# Altium footprint library FootPrintLib_8.PcbLib: 590 footprints (part 3 of 37)
Each footprint in its own frame and in the unit in brackets; x right, y up, seen from the top. Pads: shape width x height; smd on the part's side, far side on the other; paste and mask are expansions set on the pad; w line width, h text height; cw(c..) or ccw(c..) is an arc to the next point about the centre after c.
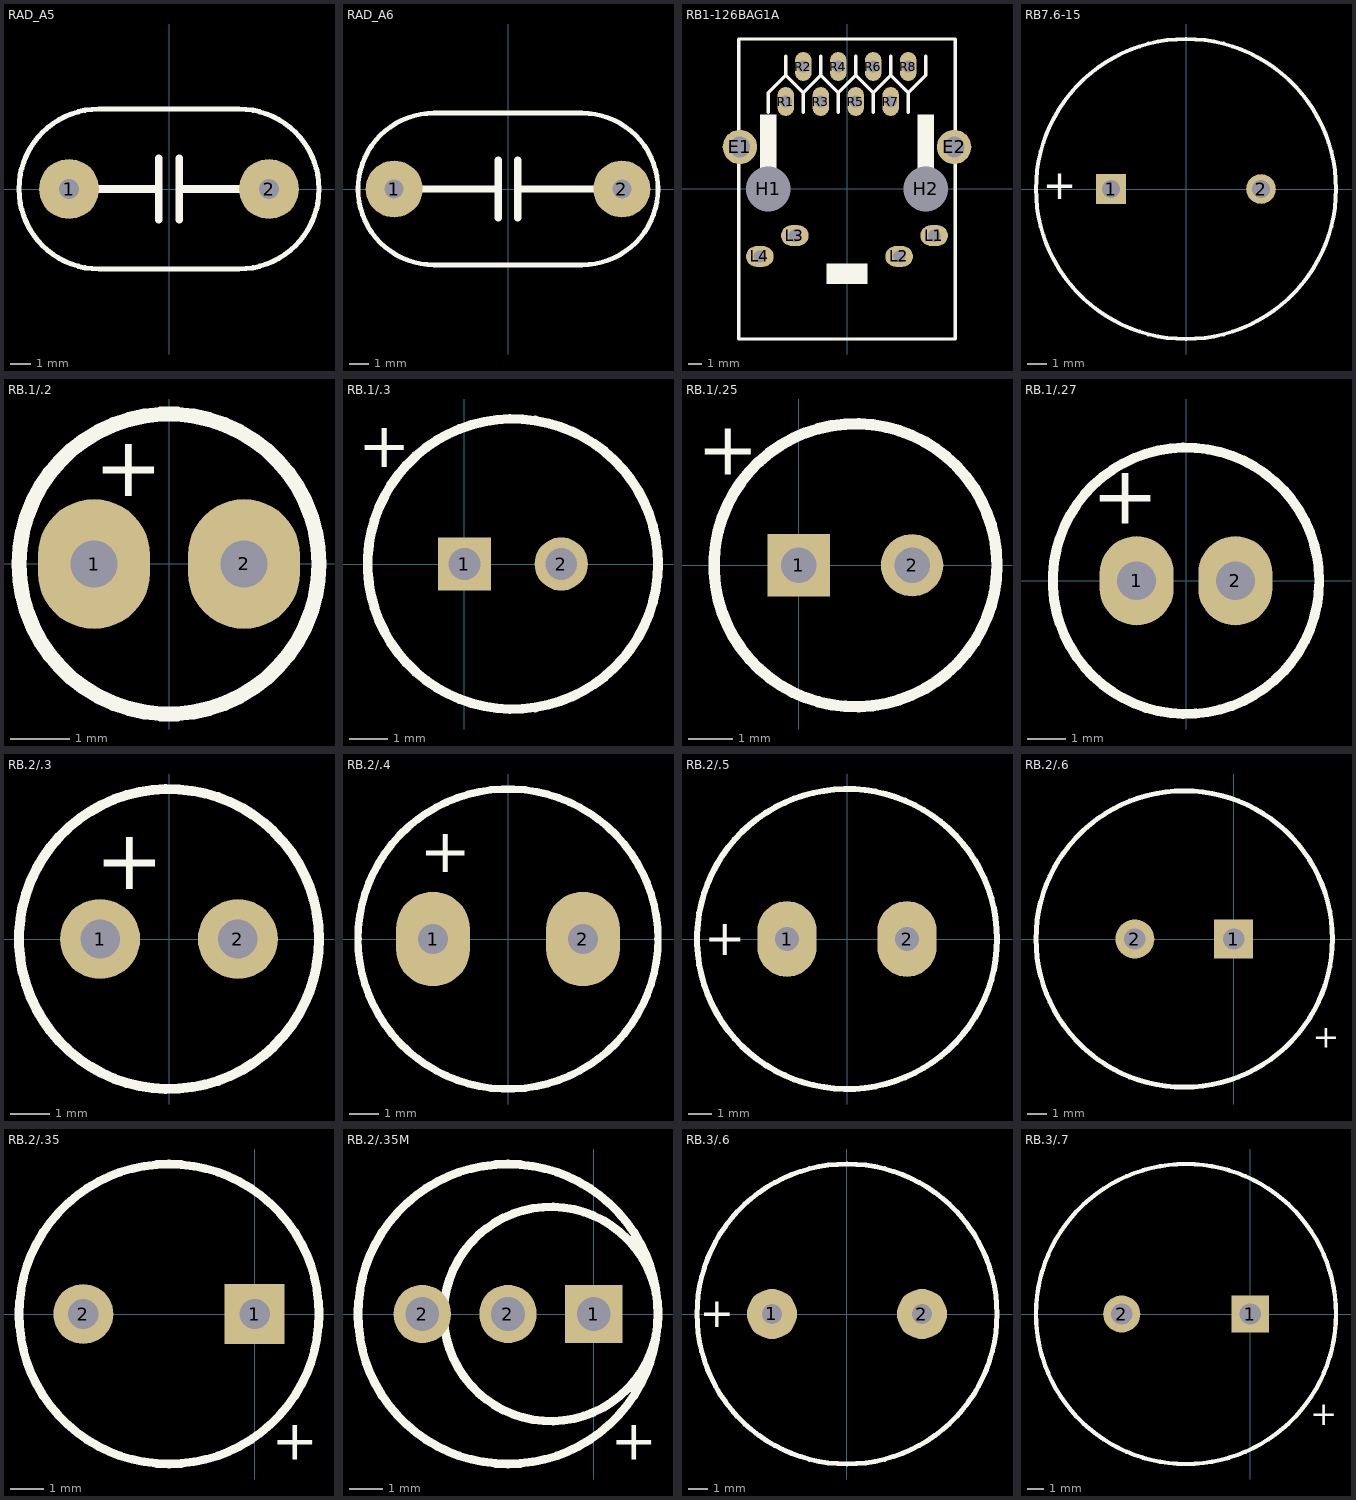
[diagram p2: the footprints below, top view; thin cyan lines are the x and y axes]

## RAD_A5 [mm] "Ceramic Capacitor"
height 19
pads (2):
  round 3 hole 1: 1(-5,0) 2(5,0)
Top Overlay:
  lines w0.254: -3.5,-4 cw(c-3.5,0) -3.5,4 3.5,4 cw(c3.5,0) 3.5,-4 -3.5,-4
  lines w0.381: -5,0 -0.508,0 ; -0.508,-1.524 -0.508,1.524 ; 0.508,-1.524 0.508,1.524 ; 0.508,0 5,0
3D body "User Library-RAD CAP 12_5MM.STEP": height 14.97, standoff -5.44, extent -6.225,-2.972 6.275,2.928

## RAD_A6 [mm] "Ceramic Capacitor"
height 10
pads (2):
  round 3 hole 1: 1(-6,0) 2(6,0)
Top Overlay:
  lines w0.254: -3.906,-4 cw(c-3.906,0) -3.906,4 3.906,4 cw(c3.906,0) 3.906,-4 -3.906,-4
  lines w0.381: -6,0 -0.508,0 ; -0.508,-1.524 -0.508,1.524 ; 0.508,-1.524 0.508,1.524 ; 0.508,0 6,0
3D body "User Library-RAD CAP 12_5MM.STEP": height 14.97, standoff -5.44, extent -6.225,-2.972 6.275,2.928

## RB1-126BAG1A [mm] "RJ-45"
height 13.35
pads (16):
  round 2.5 hole 1.5: E1(-7.775,3.05) E2(7.775,3.05)
  round 3 hole 3.25 unplated: H1(-5.715,0) H2(5.715,0)
  oval 2x1.5 hole 0.9: L1(6.325,-3.38) L2(3.785,-4.9) L3(-3.785,-3.38) L4(-6.325,-4.9)
  oval 1.2x2.1 / inner oval 1.8x2.1 / far side oval 1.8x2.1 hole 0.9: R1(-4.445,6.35) R2(-3.175,8.89) R3(-1.905,6.35) R4(-0.635,8.89) R5(0.635,6.35) R6(1.905,8.89) R7(3.175,6.35) R8(4.445,8.89)
Top Overlay:
  rectangle: -6.315,0 -5.115,5.4
  rectangle: -1.5,-6.9 1.5,-5.4
  rectangle: 5.115,0 6.315,5.4
  lines w0.254: -5.715,5.588 -5.715,6.985 -4.445,8.255 ; -4.445,9.652 -4.445,8.255 ; -3.175,5.588 -3.175,6.985 ; -1.905,9.652 -1.905,8.255 ; -0.635,5.588 -0.635,6.985 ; 0.635,9.652 0.635,8.255 ; 1.905,5.588 1.905,6.985 ; 3.175,9.652 3.175,8.255 ; 4.445,5.588 4.445,6.985 ; 5.715,9.652 5.715,8.255 4.445,6.985 ; -4.445,8.255 -3.175,6.985 ; -3.175,6.985 -1.905,8.255 ; -1.905,8.255 -0.635,6.985 ; -0.635,6.985 0.635,8.255 ; 0.635,8.255 1.905,6.985 ; 1.905,6.985 3.175,8.255 ; 3.175,8.255 4.445,6.985 ; -7.875,-10.89 -7.875,10.89 7.875,10.89 7.875,-10.89 -7.875,-10.89
Bottom Overlay:
  lines w0.254: -5.715,5.588 -5.715,6.985 -4.445,8.255 ; -4.445,9.652 -4.445,8.255 ; -3.175,5.588 -3.175,6.985 ; -1.905,9.652 -1.905,8.255 ; -0.635,5.588 -0.635,6.985 ; 0.635,9.652 0.635,8.255 ; 1.905,5.588 1.905,6.985 ; 3.175,9.652 3.175,8.255 ; 4.445,5.588 4.445,6.985 ; 5.715,9.652 5.715,8.255 4.445,6.985 ; -4.445,8.255 -3.175,6.985 ; -3.175,6.985 -1.905,8.255 ; -1.905,8.255 -0.635,6.985 ; -0.635,6.985 0.635,8.255 ; 0.635,8.255 1.905,6.985 ; 1.905,6.985 3.175,8.255 ; 3.175,8.255 4.445,6.985
3D body "SW3dPS-bothhandusalu1t516-43-lf.STEP": height 13.02, standoff -4.01, extent -7.62,-10.65 7.62,10.65

## RB7.6-15 [mm] "Polarized Capacitor (Radial); 2 Leads"
pads (2):
  rect 1.5x1.5 hole 0.914: 1(-3.81,0)
  round 1.5 hole 0.914: 2(3.81,0)
Top Overlay:
  circle w0.2: c0,0 r7.62
  text "+" at -5.556,0.764 h1.5
3D body "User Library-Cap electrolitic radial 16x26.STEP": height 26.8, standoff -0.7, extent -7.997,-7.982 7.997,7.998

## RB.1/.2 [mm]
pads (2):
  oval 1.9x2.2 hole 0.8: 1(-1.27,0) 2(1.27,0)
Top Overlay:
  circle w0.254: c0,0 r2.54
  text "+" at -1.27,1.143 h1.02
3D body "User Library-Capacitor Radial ElectroliticCAPPR200-500X1000.STEP": height 10.01, standoff -2.7, extent -2.5,-2.5 2.489,2.5

## RB.1/.3 [mm]
pads (2):
  rect 1.4x1.4 hole 0.83: 1(0,0)
  round 1.4 hole 0.83: 2(2.54,0)
Top Overlay:
  circle w0.254: c1.27,0 r3.81
  text "+" at -2.794,2.54 h1.2

## RB.1/.25 [mm]
pads (2):
  rect 1.4x1.4 hole 0.8: 1(0,0)
  round 1.4 hole 0.8: 2(2.54,0)
Top Overlay:
  circle w0.254: c1.27,0 r3.175
  text "+" at -2.286,2.032 h1.2

## RB.1/.27 [mm]
height 12
pads (2):
  oval 1.9x2.3 hole 1: 1(-1.27,0) 2(1.27,0)
Top Overlay:
  circle w0.254: c0,0 r3.429
  text "+" at -0.686,2.769 h1.52
3D body "User Library-Capacitor Radial ElectroliticCAPPR250-630X500.STEP": height 5.01, standoff -2.7, extent -3.15,-3.15 3.133,3.15

## RB.2/.3 [mm]
height 1.2
pads (2):
  round 2.032 hole 1: 1(-1.75,0) 2(1.75,0)
Top Overlay:
  circle w0.254: c0,0 r3.81
  text "+" at -1.874,1.27 h1.52
3D body "User Library-Capacitor Radial ElectroliticCAPPR250-630X500.STEP": height 5.01, standoff -2.7, extent -3.15,-3.15 3.133,3.15

## RB.2/.4 [mm]
height 1.2
pads (2):
  oval 2.5x3.2 hole 1: 1(-2.54,0) 2(2.54,0)
Top Overlay:
  circle w0.254: c0,0 r5.08
  text "+" at -1.245,3.556 h1.52
3D body "User Library-Cap electrolitic radial 10x16.STEP": height 16.8, standoff -0.7, extent -4.998,-4.986 4.998,4.999

## RB.2/.5 [mm]
height 1.2
pads (2):
  oval 2.5x3.2 hole 1: 1(-2.54,0) 2(2.54,0)
Top Overlay:
  circle w0.254: c0,0 r6.35
  text "+" at -4.293,0.635 h1.52
3D body "User Library-Cap electrolitic radial 10x16.STEP": height 16.8, standoff -0.7, extent -4.998,-4.986 4.998,4.999

## RB.2/.6 [mm]
pads (2):
  rect 2x2 hole 1.1: 1(0,0)
  round 2 hole 1.1: 2(-5.08,0)
Top Overlay:
  circle w0.254: c-2.54,0 r7.62
  text "+" at 4.064,-5.588 h1.2

## RB.2/.35 [mil]
pads (2):
  rect 70x70 hole 35.43: 1(0,0)
  round 70 hole 35.43: 2(-200,0)
Top Overlay:
  circle w10: c-100,0 r175
  text "+" at 20,-170 h47.24

## RB.2/.35M [mm]
pads (3):
  rect 1.7x1.73 hole 1: 1(0,0)
  oval 1.7x1.73 hole 1: 2(-5.08,0) 2(-2.54,0)
Top Overlay:
  circle w0.254: c-1.27,0 r3.175
  circle w0.254: c-2.54,0 r4.445
  text "+" at 0.508,-4.318 h1.2

## RB.3/.6 [mm]
pads (2):
  round 2.54 hole 1: 1(-3.81,0) 2(3.81,0)
Top Overlay:
  circle w0.254: c0,0 r7.62
  text "+" at -5.715,0.635 h1.52
3D body "Capacitor 7.5x16x20.STEP": height 20.01, standoff -2.7, extent -7.925,-7.974 8.017,8.026

## RB.3/.7 [mm]
pads (2):
  rect 2.2x2.2 hole 1.25: 1(0,0)
  round 2.2 hole 1.25: 2(-7.62,0)
Top Overlay:
  circle w0.254: c-3.81,0 r8.89
  text "+" at 3.556,-6.604 h1.4